# Altium schematic symbol library SS34.SchLib: 1 symbol
Pins are listed as number, name and electrical type; pins without a type are passive.

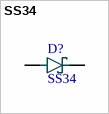
[diagram p0: symbol SS34]

## SS34
designator D?
Diode Schottky; MF: Diodes Inc.; MP: B160-13-F; Price: None; Availability: Unavailable; SnapEDA_Link: https://www.snapeda.com/parts/B160-13-F/Diodes%20Inc./view-part/248179/?ref=snap; Value: *; Package: DO-214 Diodes Inc.
footprint SS34 (DO-214)
pins: A, C